# Altium schematic symbol library PESD15VL2BT.SchLib: 1 symbol
Pins are listed as number, name and electrical type; pins without a type are passive.

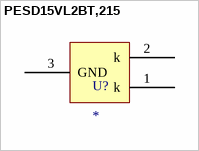
[diagram p0: symbol PESD15VL2BT,215]

## PESD15VL2BT,215
designator U?
44V Clamp 5A (8/20µs) Ipp Tvs Diode Surface Mount TO-236AB / PESD15VL2BT,215
footprint SOT95P280X145-5N
pins: 1 k, 2 k, 3 GND